# Altium footprint library UCP.PcbLib: 222 footprints (part 5 of 14)
Each footprint in its own frame and in the unit in brackets; x right, y up, seen from the top. Pads: shape width x height; smd on the part's side, far side on the other; paste and mask are expansions set on the pad; w line width, h text height; cw(c..) or ccw(c..) is an arc to the next point about the centre after c.
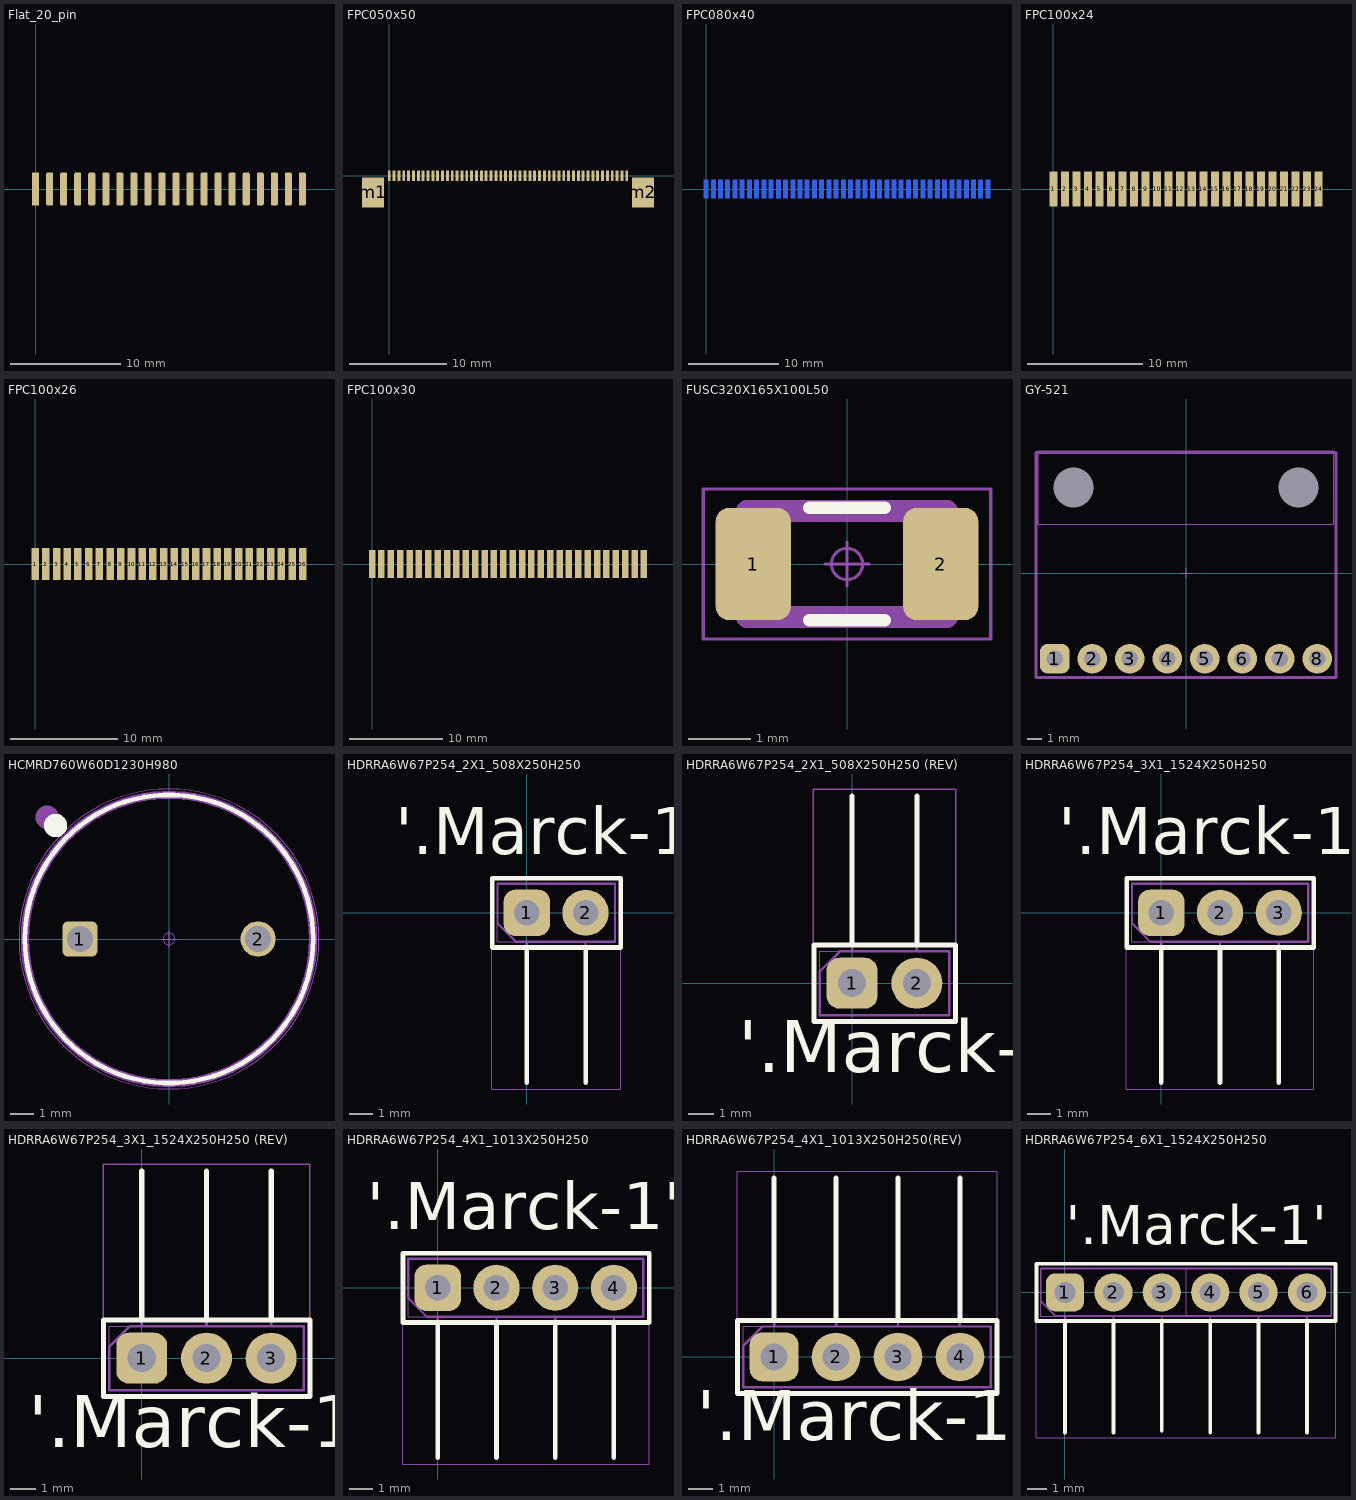
[diagram p4: the footprints below, top view; thin cyan lines are the x and y axes]

## Flat_20_pin [mm]
pads (20):
  rect 0.635x3 smd: 1(0,0)
  rrect50% 0.635x3 smd: 2(1.27,0) 3(2.54,0) 4(3.81,0) 5(5.08,0) 6(6.35,0) 7(7.62,0) 8(8.89,0) 9(10.16,0) 10(11.43,0) 11(12.7,0) 12(13.97,0) 13(15.24,0) 14(16.51,0) 15(17.78,0) 16(19.05,0) 17(20.32,0) 18(21.59,0) 19(22.86,0) 20(24.13,0)
Top Designator:
  text ".Designator" at -4.511,-0.453 h2

## FPC050x50 [mm]
pads (53):
  rect 0.3x1.1 smd mask+0: 1(0,0) 1(0,0) 2(0.5,0) 3(1,0) 4(1.5,0) 5(2,0) 6(2.5,0) 7(3,0) 8(3.5,0) 9(4,0) 10(4.5,0) 11(5,0) 12(5.5,0) 13(6,0) 14(6.5,0) 15(7,0) 16(7.5,0) 17(8,0) 18(8.5,0) 19(9,0) 20(9.5,0) 21(10,0) 22(10.5,0) 23(11,0) 24(11.5,0) 25(12,0) 26(12.5,0) 27(13,0) 28(13.5,0) 29(14,0) 30(14.5,0) 31(15,0) 32(15.5,0) 33(16,0) 34(16.5,0) 35(17,0) 36(17.5,0) 37(18,0) 38(18.5,0) 39(19,0) 40(19.5,0) 41(20,0) 42(20.5,0) 43(21,0) 44(21.5,0) 45(22,0) 46(22.5,0) 47(23,0) 48(23.5,0) 49(24,0) 50(24.5,0)
  rect 2.3x3.1 smd: m1(-1.67,-1.7) m2(26.17,-1.7)
3D body "c-5-1734592-0-c-3d.stp": height 2.02, standoff -0.03, extent -2.965,-4.75 27.465,0.36

## FPС080x40 [mm] "0.8 mm FPC 40 pin"
height 0.3
pads (40):
  rect 0.5x2 smd far side mask+0: 1(31.2,0) 2(30.4,0) 3(29.6,0) 4(28.8,0) 5(28,0) 6(27.2,0) 7(26.4,0) 8(25.6,0) 9(24.8,0) 10(24,0) 11(23.2,0) 12(22.4,0) 13(21.6,0) 14(20.8,0) 15(20,0) 16(19.2,0) 17(18.4,0) 18(17.6,0) 19(16.8,0) 20(16,0) 21(15.2,0) 22(14.4,0) 23(13.6,0) 24(12.8,0) 25(12,0) 26(11.2,0) 27(10.4,0) 28(9.6,0) 29(8.8,0) 30(8,0) 31(7.2,0) 32(6.4,0) 33(5.6,0) 34(4.8,0) 35(4,0) 36(3.2,0) 37(2.4,0) 38(1.6,0) 39(0.8,0) 40(0,0)

## FPС100x24 [mm] "1.00mm FPC 24 pin"
height 0.3
pads (24):
  rect 0.7x3 smd mask+0: 1(0,0) 2(1,0) 3(2,0) 4(3,0) 5(4,0) 6(5,0) 7(6,0) 8(7,0) 9(8,0) 10(9,0) 11(10,0) 12(11,0) 13(12,0) 14(13,0) 15(14,0) 16(15,0) 17(16,0) 18(17,0) 19(18,0) 20(19,0) 21(20,0) 22(21,0) 23(22,0) 24(23,0)
Top Solder:
  rectangle: -1,-1.6 24,1.6

## FPС100x26 [mm] "1.00mm FPC 26 pin"
height 0.3
pads (26):
  rect 0.7x3 smd mask+0: 1(0,0) 2(1,0) 3(2,0) 4(3,0) 5(4,0) 6(5,0) 7(6,0) 8(7,0) 9(8,0) 10(9,0) 11(10,0) 12(11,0) 13(12,0) 14(13,0) 15(14,0) 16(15,0) 17(16,0) 18(17,0) 19(18,0) 20(19,0) 21(20,0) 22(21,0) 23(22,0) 24(23,0) 25(24,0) 26(25,0)
Top Solder:
  rectangle: -1,-1.6 26,1.6

## FPС100x30 [mm] "1.00mm FPC 30 pin"
height 0.3
pads (30):
  rect 0.7x3 smd mask+0: 1(0,0) 2(1,0) 3(2,0) 4(3,0) 5(4,0) 6(5,0) 7(6,0) 8(7,0) 9(8,0) 10(9,0) 11(10,0) 12(11,0) 13(12,0) 14(13,0) 15(14,0) 16(15,0) 17(16,0) 18(17,0) 19(18,0) 20(19,0) 21(20,0) 22(21,0) 23(22,0) 24(23,0) 25(24,0) 26(25,0) 27(26,0) 28(27,0) 29(28,0) 30(29,0)
Top Solder:
  rectangle: -1,-1.6 30,1.6

## FUSC320X165X100L50 [mm] "Fuse, Chip; 2 pin, 3.40 mm L X 1.80 mm W X 0.75 mm H body"
height 1
pads (2):
  rrect36% 1.2x1.8 smd: 1(-1.5,0) 2(1.5,0)
Top Overlay:
  lines w0.2: -0.605,-0.9 0.605,-0.9 ; -0.605,0.9 0.605,0.9
Top Designator:
  text ".Designator" at -4.511,-0.453 h2
Top Assembly:
  lines w0.35: -1.6,-0.85 -1.6,0.85 1.6,0.85 1.6,-0.85 -1.6,-0.85
Top Courtyard:
  circle w0.05: c0,0 r0.25
  lines w0.05: -0.35,0 0.35,0 ; 0,-0.35 0,0.35 ; -2.3,-1.2 -2.3,1.2 2.3,1.2 2.3,-1.2 -2.3,-1.2
Top Component Outline:
  lines w0.05: -1.55,-0.8 -1.55,0.8 1.55,0.8 1.55,-0.8 -1.55,-0.8
Top Component Terminal:
  lines w0.05: -1.55,-0.8 -1.15,-0.8 -1.15,0.8 -1.55,0.8 -1.55,-0.8 ; 1.15,-0.8 1.15,0.8 1.55,0.8 1.55,-0.8 1.15,-0.8
3D body "FUSC320X165X100L50.stp": height 1, standoff 0, extent -1.6,-0.825 1.6,0.825

## GY-521 [mm] "3 Axis Gyro Accelerometer Sensor Module with Connector"
height 14.5
pads (10):
  rrect50% 2x2 hole 1.1: 1(-8.89,-5.8)
  round 2 hole 1.1: 2(-6.35,-5.8) 3(-3.81,-5.8) 4(-1.27,-5.8) 5(1.27,-5.8) 6(3.81,-5.8) 7(6.35,-5.8) 8(8.89,-5.8)
  round 0 hole 2.7 unplated mask+0.25: MT1(-7.62,5.8) MT2(7.62,5.8)
Top Assembly:
  lines w0.2: -10.16,-7.07 -10.16,8.17 10.16,8.17 10.16,-7.07 -10.16,-7.07
Top Courtyard:
  lines w0.05: -0.35,0 0.35,0 ; 0,-0.35 0,0.35 ; -10.16,-7.07 10.16,-7.07 10.16,8.17 -10.16,8.17 -10.16,-7.07
Top Component Outline:
  lines w0.05: -10,3.3 10,3.3 10,8.3 -10,8.3 -10,3.3
3D body "GY-521_assembly.stp": height 14.2, standoff -3, extent -10.41,-7.39 10.41,8.3

## HCMRD760W60D1230H980 [mm] "Inductor, Polarized, Radial (Inductor); 7.60 mm C X 12.30 mm Dia X 9.80 mm H body"
height 9.8
pads (2):
  rrect33% 1.5x1.5 / inner round 1.5 / far side rrect33% 1.5x1.5 hole 1.1 paste-1.5: 1(-3.8,0)
  round 1.5 hole 1.1 paste-1.5: 2(3.8,0)
Top Overlay:
  circle w0.2: c0,0 r6.15
  circle w0.5: c-4.844,4.844 r0.25
Top Designator:
  text ".Designator" at -4.511,-0.453 h2
Top Assembly:
  circle w0.35: c0,0 r6.15
  circle w0.5: c-5.197,5.197 r0.25
Top Courtyard:
  circle w0.05: c0,0 r6.4
  circle w0.05: c0,0 r0.25
  lines w0.05: -0.35,0 0.35,0 ; 0,-0.35 0,0.35
Top Component Outline:
  circle w0.05: c0,0 r6.15
Top Component Terminal:
  circle w0.05: c-3.8,0 r0.325
  circle w0.05: c3.8,0 r0.325
3D body "HCMRD760W60D1230H980.STEP": height 9.8, standoff -2, extent -6.15,-6.15 6.15,6.15

## HDRRA6W67P254_2X1_508X250H250 [mm] "Header, Right Angle Post, 2.54 mm pitch; 0.67 mm lead width, 2 pins, 1 row, 2 pins per row, 5.08 mm L X 2.50 mm W X 2.50 mm H body"
height 2.5
pads (2):
  rrect50% 2x2 hole 1.1: 1(0,0)
  round 2 hole 1.1: 2(2.54,0)
Top Overlay:
  lines w0.2: 0,-7.35 0,-1.52 ; 2.54,-7.35 2.54,-1.5 ; -1.5,-1.5 -1.5,1.5 4.06,1.5 4.06,-1.5 -1.5,-1.5
  text "'.Marck-1'" at -5.691,1.854 h3.5
Top Designator:
  text ".Designator" at -4.511,-0.453 h2
Top Assembly:
  lines w0.1: 0,-7.35 0,-1.25 ; 2.54,-7.35 2.54,-1.25 ; -1.27,-0.455 -0.475,-1.25 3.81,-1.25 3.81,1.25 -1.27,1.25 -1.27,-0.455
Top Courtyard:
  circle w0.05: c0,0 r0.25
  lines w0.05: -0.35,0 0.35,0 ; 0,-0.35 0,0.35 ; -1.52,-7.62 -1.52,1.5 4.06,1.5 4.06,-7.62 -1.52,-7.62
Top Component Outline:
  lines w0.025: -1.27,-1.25 -1.27,1.25 3.81,1.25 3.81,-1.25 -1.27,-1.25
Top Component Terminal:
  lines w0.025: -0.335,-0.335 -0.335,0.335 0.335,0.335 0.335,-0.335 -0.335,-0.335 ; 2.205,-0.335 2.205,0.335 2.875,0.335 2.875,-0.335 2.205,-0.335
3D body "HDRRA2W67P254_2X1_508X250H250_CF.stp": height 5.45, standoff -3, extent -1.27,-7.35 3.81,1.27

## HDRRA6W67P254_2X1_508X250H250 (REV) [mm] "Header, Right Angle Post, 2.54 mm pitch; 0.67 mm lead width,2 pins, 1 row, 2 pins per row, 5.08 mm L X 2.50 mm W X 2.50 mm H body"
height 2.5
pads (2):
  rrect50% 2x2 hole 1.1: 1(0,0)
  round 2 hole 1.1: 2(2.54,0)
Top Overlay:
  lines w0.2: 0,1.52 0,7.35 ; 2.54,1.5 2.54,7.35 ; -1.5,-1.5 4.06,-1.5 4.06,1.5 -1.5,1.5 -1.5,-1.5
  text "'.Marck-1'" at -4.462,-4.151 h3.5
Top Designator:
  text ".Designator" at -4.511,-0.453 h2
Top Assembly:
  lines w0.1: 0,1.25 0,7.35 ; 2.54,1.25 2.54,7.35 ; -1.27,-1.25 -1.27,0.455 -0.475,1.25 3.81,1.25 3.81,-1.25 -1.27,-1.25
Top Courtyard:
  circle w0.05: c0,0 r0.25
  lines w0.05: -0.35,0 0.35,0 ; 0,-0.35 0,0.35 ; -1.52,-1.5 4.06,-1.5 4.06,7.62 -1.52,7.62 -1.52,-1.5
Top Component Outline:
  lines w0.025: -1.27,-1.25 3.81,-1.25 3.81,1.25 -1.27,1.25 -1.27,-1.25
Top Component Terminal:
  lines w0.025: -0.335,-0.335 0.335,-0.335 0.335,0.335 -0.335,0.335 -0.335,-0.335 ; 2.205,-0.335 2.875,-0.335 2.875,0.335 2.205,0.335 2.205,-0.335
3D body "HDRRA2W67P254_2X1_508X250H250_CF.stp": height 5.45, standoff -3, extent -1.27,-1.27 3.81,7.35

## HDRRA6W67P254_3X1_1524X250H250 [mm] "Header, Right Angle Post, 2.54 mm pitch; 0.67 mm lead width, 6 pins, 1 row, 6 pins per row, 7.62 mm L X 2.50 mm W X 2.50 mm H body"
height 2.5
pads (3):
  rrect50% 2x2 hole 1.1: 1(0,0)
  round 2 hole 1.1: 2(2.54,0) 3(5.08,0)
Top Overlay:
  lines w0.2: 0,-7.35 0,-1.52 ; 2.54,-7.35 2.54,-1.5 ; 5.08,-7.35 5.08,-1.55 ; -1.5,-1.5 6.6,-1.5 6.6,1.5 -1.5,1.5 -1.5,-1.5
  text "'.Marck-1'" at -4.462,1.854 h3.5
Top Designator:
  text ".Designator" at -4.511,-0.453 h2
Top Assembly:
  drawing of 11 lines, arcs and shapes, not listed
Top Courtyard:
  circle w0.05: c0,0 r0.25
  lines w0.05: -0.35,0 0.35,0 ; 0,-0.35 0,0.35 ; -1.52,-7.62 6.6,-7.62 6.6,1.5 -1.52,1.5 -1.52,-7.62
Top Component Outline:
  lines w0.025: -1.27,-1.25 6.35,-1.25 6.35,1.25 -1.27,1.25 -1.27,-1.25
Top Component Terminal:
  lines w0.025: -0.335,-0.335 0.335,-0.335 0.335,0.335 -0.335,0.335 -0.335,-0.335 ; 2.205,-0.335 2.875,-0.335 2.875,0.335 2.205,0.335 2.205,-0.335 ; 4.745,-0.335 5.415,-0.335 5.415,0.335 4.745,0.335 4.745,-0.335
3D body "HDRRA3W67P254_3X1_762X250H250_CF.step": height 5.45, standoff -3, extent -1.27,-7.35 6.35,1.27

## HDRRA6W67P254_3X1_1524X250H250 (REV) [mm] "Header, Right Angle Post, 2.54 mm pitch; 0.67 mm lead width, 6 pins, 1 row, 6 pins per row, 7.62 mm L X 2.50 mm W X 2.50 mm H body"
height 2.5
pads (3):
  rrect50% 2x2 hole 1.1: 1(0,0)
  round 2 hole 1.1: 2(2.54,0) 3(5.08,0)
Top Overlay:
  lines w0.2: 0,1.52 0,7.35 ; 2.54,1.5 2.54,7.35 ; 5.08,1.55 5.08,7.35 ; -1.5,-1.5 6.6,-1.5 6.6,1.5 -1.5,1.5 -1.5,-1.5
  text "'.Marck-1'" at -4.462,-4.151 h3.5
Top Designator:
  text ".Designator" at -4.511,-0.453 h2
Top Assembly:
  drawing of 11 lines, arcs and shapes, not listed
Top Courtyard:
  circle w0.05: c0,0 r0.25
  lines w0.05: -0.35,0 0.35,0 ; 0,-0.35 0,0.35 ; -1.52,-1.5 -1.52,7.62 6.6,7.62 6.6,-1.5 -1.52,-1.5
Top Component Outline:
  lines w0.025: -1.27,-1.25 6.35,-1.25 6.35,1.25 -1.27,1.25 -1.27,-1.25
Top Component Terminal:
  lines w0.025: -0.335,-0.335 0.335,-0.335 0.335,0.335 -0.335,0.335 -0.335,-0.335 ; 2.205,-0.335 2.875,-0.335 2.875,0.335 2.205,0.335 2.205,-0.335 ; 4.745,-0.335 5.415,-0.335 5.415,0.335 4.745,0.335 4.745,-0.335
3D body "HDRRA3W67P254_3X1_762X250H250_CF.step": height 5.45, standoff -3, extent -1.27,-1.27 6.35,7.35

## HDRRA6W67P254_4X1_1013X250H250 [mm] "Header, Right Angle Post, 2.54 mm pitch; 0.67 mm lead width, 4 pins, 1 row, 4 pins per row, 10.13 mm L X 2.50 mm W X 2.50 mm H body"
height 2.5
pads (4):
  rrect50% 2x2 hole 1.1: 1(0,0)
  round 2 hole 1.1: 2(2.54,0) 3(5.08,0) 4(7.62,0)
Top Overlay:
  lines w0.2: 0,-7.35 0,-1.52 ; 2.54,-7.35 2.54,-1.5 ; 5.08,-7.35 5.08,-1.55 ; 7.62,-7.35 7.62,-1.55 ; -1.5,-1.5 9.14,-1.5 9.14,1.5 -1.5,1.5 -1.5,-1.5
  text "'.Marck-1'" at -3.062,1.854 h3.5
Top Designator:
  text ".Designator" at -4.511,-0.453 h2
Top Assembly:
  drawing of 12 lines, arcs and shapes, not listed
Top Courtyard:
  circle w0.05: c0,0 r0.25
  lines w0.05: -0.35,0 0.35,0 ; 0,-0.35 0,0.35 ; -1.52,-7.62 -1.52,1.5 9.14,1.5 9.14,-7.62 -1.52,-7.62
Top Component Outline:
  lines w0.025: -1.27,-1.25 -1.27,1.25 8.89,1.25 8.89,-1.25 -1.27,-1.25
Top Component Terminal:
  lines w0.025: -0.335,-0.335 -0.335,0.335 0.335,0.335 0.335,-0.335 -0.335,-0.335 ; 2.205,-0.335 2.205,0.335 2.875,0.335 2.875,-0.335 2.205,-0.335 ; 4.745,-0.335 4.745,0.335 5.415,0.335 5.415,-0.335 4.745,-0.335 ; 7.285,-0.335 7.285,0.335 7.955,0.335 7.955,-0.335 7.285,-0.335
3D body "HDRRA6W67P254_4X1_1013X250H250.stp": height 5.45, standoff -3, extent -1.27,-7.35 8.89,1.27

## HDRRA6W67P254_4X1_1013X250H250(REV) [mm] "Header, Right Angle Post, 2.54 mm pitch; 0.67 mm lead width, 4 pins, 1 row, 4 pins per row, 10.13 mm L X 2.50 mm W X 2.50 mm H body"
height 2.5
pads (4):
  rrect50% 2x2 hole 1.1: 1(0,0)
  round 2 hole 1.1: 2(2.54,0) 3(5.08,0) 4(7.62,0)
Top Overlay:
  lines w0.2: 0,1.52 0,7.35 ; 2.54,1.5 2.54,7.35 ; 5.08,1.55 5.08,7.35 ; 7.62,1.55 7.62,7.35 ; -1.5,-1.5 9.14,-1.5 9.14,1.5 -1.5,1.5 -1.5,-1.5
  text "'.Marck-1'" at -3.162,-4.096 h3.5
Top Designator:
  text ".Designator" at -4.511,-0.453 h2
Top Assembly:
  lines w0.1: 0,1.25 0,7.35 ; 2.54,1.25 2.54,7.35 ; 5.08,1.25 5.08,7.35 ; 7.62,1.25 7.62,7.35 ; -1.27,-1.25 8.89,-1.25 8.89,1.25 -0.475,1.25 -1.27,0.455 -1.27,-1.25
Top Courtyard:
  circle w0.05: c0,0 r0.25
  lines w0.05: -0.35,0 0.35,0 ; 0,-0.35 0,0.35 ; -1.52,-1.5 9.14,-1.5 9.14,7.62 -1.52,7.62 -1.52,-1.5
Top Component Outline:
  lines w0.025: -1.27,-1.25 -1.27,1.25 8.89,1.25 8.89,-1.25 -1.27,-1.25
Top Component Terminal:
  lines w0.025: -0.335,-0.335 -0.335,0.335 0.335,0.335 0.335,-0.335 -0.335,-0.335 ; 2.205,-0.335 2.205,0.335 2.875,0.335 2.875,-0.335 2.205,-0.335 ; 4.745,-0.335 4.745,0.335 5.415,0.335 5.415,-0.335 4.745,-0.335 ; 7.285,-0.335 7.285,0.335 7.955,0.335 7.955,-0.335 7.285,-0.335
3D body "HDRRA6W67P254_4X1_1013X250H250.stp": height 5.45, standoff -3, extent -1.27,-1.27 8.89,7.35

## HDRRA6W67P254_6X1_1524X250H250 [mm] "Header, Right Angle Post, 2.54 mm pitch; 0.67 mm lead width, 6 pins, 1 row, 6 pins per row, 15.24 mm L X 2.50 mm W X 2.50 mm H body"
height 2.5
pads (6):
  rrect50% 2x2 hole 1.1: 1(0,0)
  round 2 hole 1.1: 2(2.54,0) 3(5.08,0) 4(7.62,0) 5(10.16,0) 6(12.7,0)
Top Overlay:
  lines w0.2: 0,-7.35 0,-1.52 ; 2.54,-7.35 2.54,-1.5 ; 5.08,-7.25 5.08,-1.55 ; 7.62,-7.35 7.62,-1.55 ; 10.16,-7.35 10.16,-1.55 ; 12.7,-7.35 12.7,-1.55 ; -1.5,-1.5 -1.5,1.5 14.2,1.5 14.2,-1.5 -1.5,-1.5
  text "'.Marck-1'" at 0.038,1.849 h3.5
Top Designator:
  text ".Designator" at -4.511,-0.453 h2
Top Assembly:
  drawing of 17 lines, arcs and shapes, not listed
Top Courtyard:
  circle w0.05: c0,0 r0.25
  lines w0.05: -0.35,0 0.35,0 ; 0,-0.35 0,0.35 ; -1.52,-7.62 -1.52,1.5 14.22,1.5 14.22,-7.62 -1.52,-7.62
Top Component Outline:
  lines w0.025: -1.27,-1.25 -1.27,1.25 6.35,1.25 6.35,-1.25 -1.27,-1.25
Top Component Terminal:
  lines w0.025: -0.335,-0.335 -0.335,0.335 0.335,0.335 0.335,-0.335 -0.335,-0.335 ; 2.205,-0.335 2.205,0.335 2.875,0.335 2.875,-0.335 2.205,-0.335 ; 4.745,-0.335 4.745,0.335 5.415,0.335 5.415,-0.335 4.745,-0.335
3D body "HDRRA3W67P254_3X1_762X250H250_CF.step": height 5.45, standoff -3, extent 6.35,-7.35 13.97,1.27
3D body "HDRRA3W67P254_3X1_762X250H250_CF.step": height 5.45, standoff -3, extent -1.27,-7.35 6.35,1.27